# EAGLE library part WFM200S022XNA3 (library WFM200S022XNA3)
Ultra Low Power Wi-Fi transceiver or network co-processor (NCP) SiP module Source: Datasheet <https://www.silabs.com/documents/public/data-sheets/wfm200-datasheet.pdf>
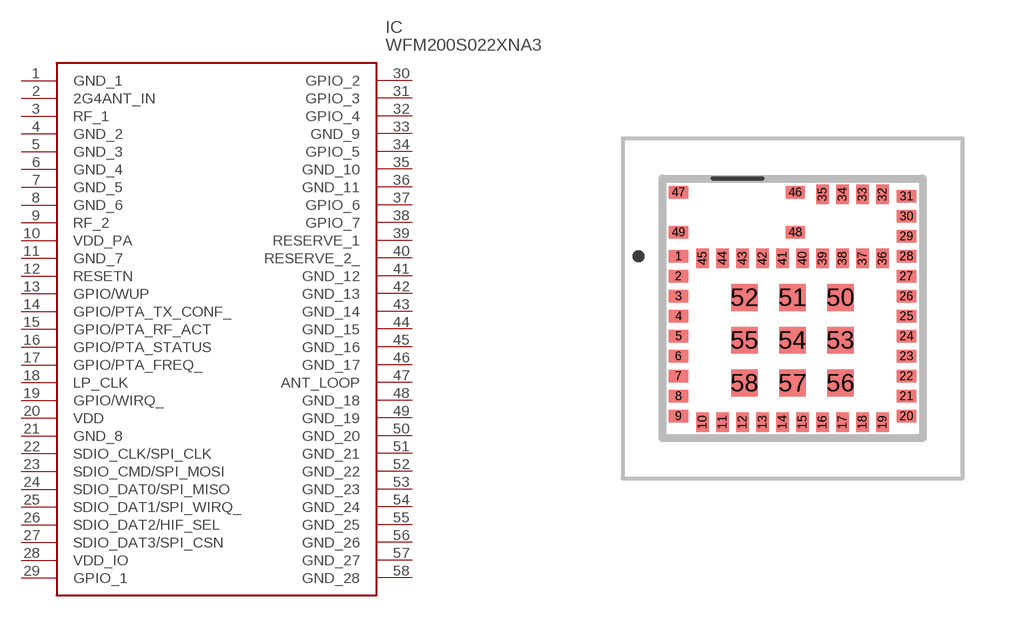
[diagram p0: symbol with the pads of WFM200S022XNA3; footprint WFM200S022XNA3]

Designator prefix IC

## WFM200S022XNA3 (Description: Ultra Low Power Wi-Fi transceiver or network co-processor (NCP) SiP module; Height: 1.4mm; Manufacturer_Name: Silicon Labs; Manufacturer_Part_Number: WFM200S022XNA3; Mouser_Part_Number: 634-WFM200S022XNA3; Mouser_Price-Stock: https://www.mouser.co.uk/ProductDetail/Silicon-Labs/WFM200S022XNA3?qs=vEM7xhTegWgk98Fa7%252BnIXQ%3D%3D)  [WFM200S022XNA3]
1  GND_1
2  2G4ANT_IN
3  RF_1
4  GND_2
5  GND_3
6  GND_4
7  GND_5
8  GND_6
9  RF_2
10  VDD_PA
11  GND_7
12  RESETN
13  GPIO/WUP
14  GPIO/PTA_TX_CONF_
15  GPIO/PTA_RF_ACT
16  GPIO/PTA_STATUS
17  GPIO/PTA_FREQ_
18  LP_CLK
19  GPIO/WIRQ_
20  VDD
21  GND_8
22  SDIO_CLK/SPI_CLK
23  SDIO_CMD/SPI_MOSI
24  SDIO_DAT0/SPI_MISO
25  SDIO_DAT1/SPI_WIRQ_
26  SDIO_DAT2/HIF_SEL
27  SDIO_DAT3/SPI_CSN
28  VDD_IO
29  GPIO_1
30  GPIO_2
31  GPIO_3
32  GPIO_4
33  GND_9
34  GPIO_5
35  GND_10
36  GND_11
37  GPIO_6
38  GPIO_7
39  RESERVE_1
40  RESERVE_2_
41  GND_12
42  GND_13
43  GND_14
44  GND_15
45  GND_16
46  GND_17
47  ANT_LOOP
48  GND_18
49  GND_19
50  GND_20
51  GND_21
52  GND_22
53  GND_23
54  GND_24
55  GND_25
56  GND_26
57  GND_27
58  GND_28

## Footprint WFM200S022XNA3 (pad centres in mm)
WFM200S
smd 0.48 x 0.32: 1 -2.85,1.3; 2 -2.85,0.8; 3 -2.85,0.3; 4 -2.85,-0.2; 5 -2.85,-0.7; 6 -2.85,-1.2; 7 -2.85,-1.7; 8 -2.85,-2.2; 9 -2.85,-2.7; 20 2.85,-2.7; 21 2.85,-2.2; 22 2.85,-1.7; 23 2.85,-1.2; 24 2.85,-0.7; 25 2.85,-0.2; 26 2.85,0.3; 27 2.85,0.8; 28 2.85,1.3; 29 2.85,1.8; 30 2.85,2.3; 31 2.85,2.8; 46 0.07,2.9; 47 -2.85,2.9; 48 0.07,1.9; 49 -2.85,1.9
smd 0.32 x 0.48: 10 -2.25,-2.85; 11 -1.75,-2.85; 12 -1.25,-2.85; 13 -0.75,-2.85; 14 -0.25,-2.85; 15 0.25,-2.85; 16 0.75,-2.85; 17 1.25,-2.85; 18 1.75,-2.85; 19 2.25,-2.85; 32 2.25,2.85; 33 1.75,2.85; 34 1.25,2.85; 35 0.75,2.85; 36 2.25,1.25; 37 1.75,1.25; 38 1.25,1.25; 39 0.75,1.25; 40 0.25,1.25; 41 -0.25,1.25; 42 -0.75,1.25; 43 -1.25,1.25; 44 -1.75,1.25; 45 -2.25,1.25
smd 0.67 x 0.67: 50 1.2,0.27; 51 0,0.27; 52 -1.2,0.27; 53 1.2,-0.8; 54 0,-0.8; 55 -1.2,-0.8; 56 1.2,-1.87; 57 0,-1.87; 58 -1.2,-1.87